# Altium schematic symbol library Sensors-LIB-SCH.SchLib: 19 symbols
Pins are listed as number, name and electrical type; pins without a type are passive.

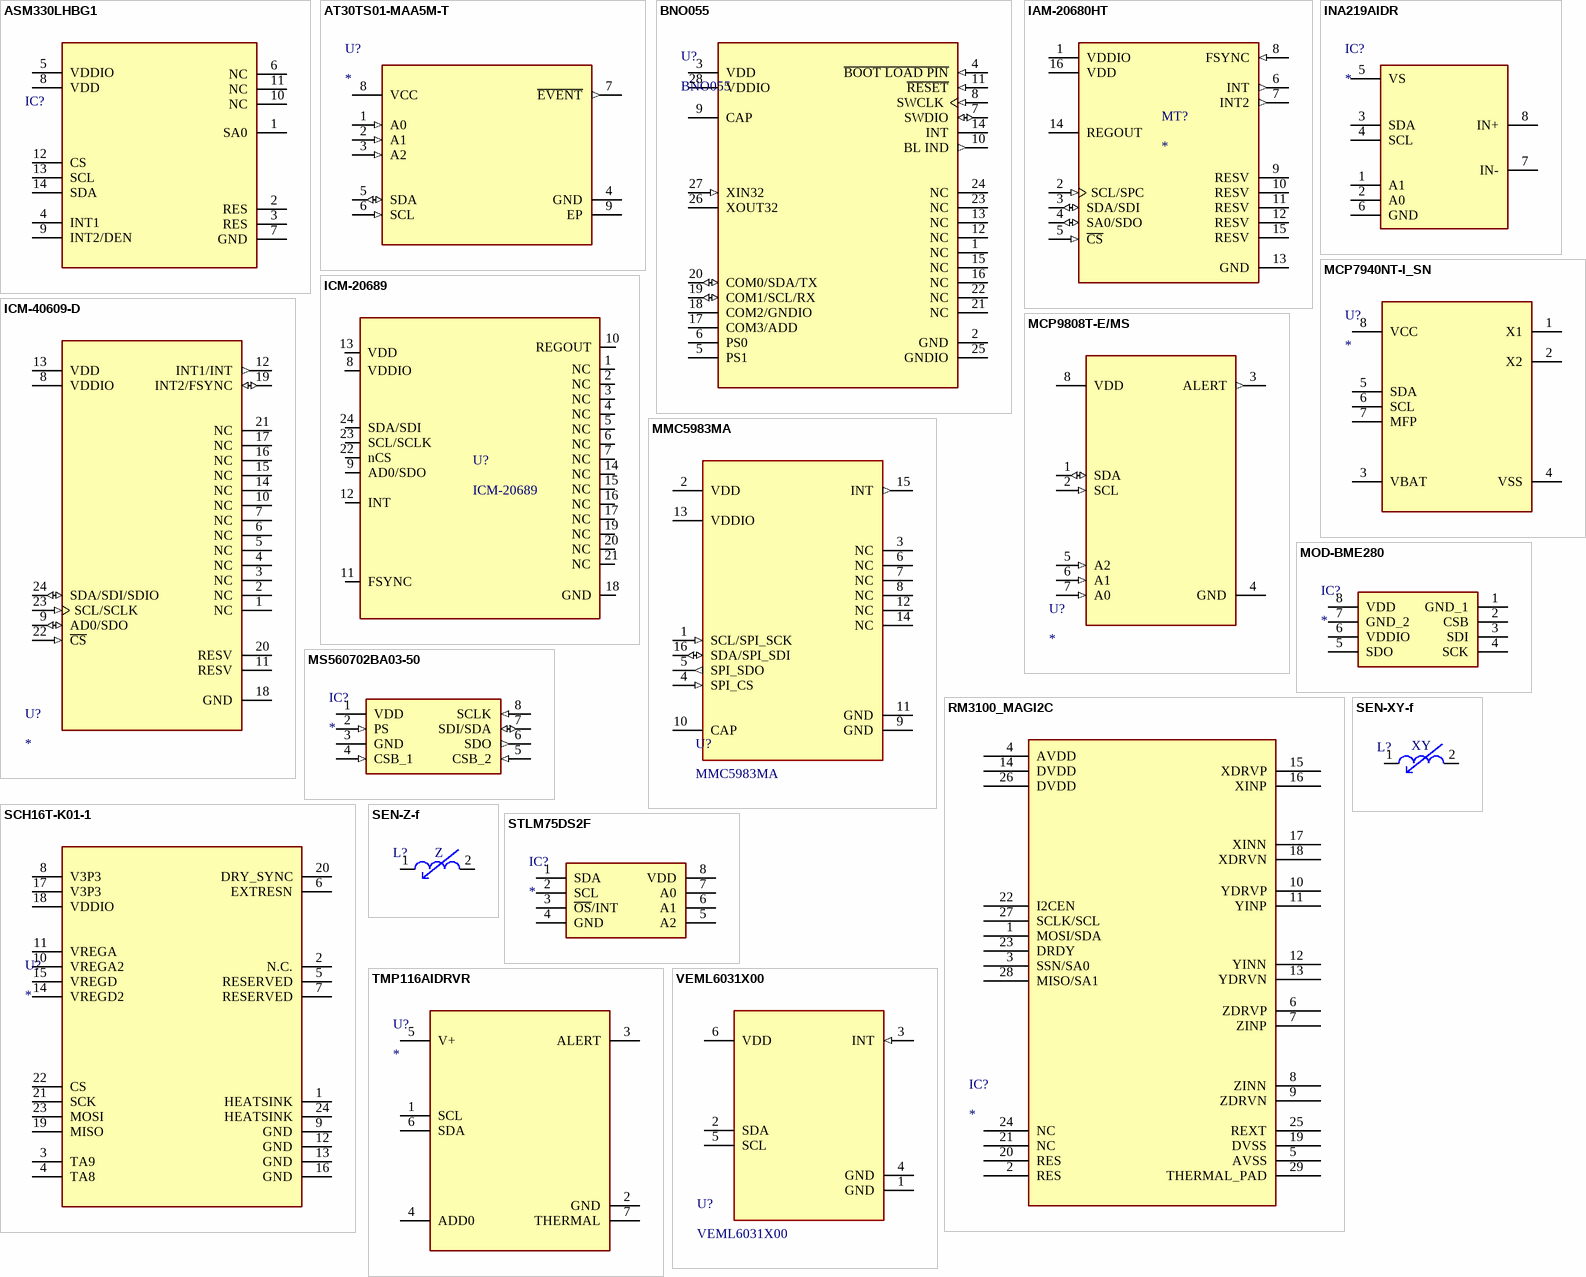
[diagram p0: symbols ASM330LHBG1 to VEML6031X00]

## ASM330LHBG1
designator IC?
Population Status: YES
footprint LGA-14L 2.5 x 3.0 x 0.86
pins: 1 SA0, 2 RES, 3 RES, 4 INT1, 5 VDDIO, 6 NC, 7 GND, 8 VDD, 9 INT2/DEN, 10 NC, 11 NC, 12 CS, 13 SCL, 14 SDA

## AT30TS01-MAA5M-T
designator U?
Integrated Circuit; Manufacturer: Microchip; Manufacturer Part Number: AT30TS01-MAA5M-T; Population Status: YES; Datasheet Link: https://pt.mouser.com/datasheet/2/268/microchip_technology_mchp_s_a0001400554_1-1738106.pdf; Height: 0.8mm; Supplier Part Number: 556-AT30TS01-MAA5M-T
footprint SON50P300X200X80-9N
pins: 1 A0 (in), 2 A1 (in), 3 A2 (in), 4 GND, 5 SDA (io), 6 SCL (in), 7 ~{EVENT} (out), 8 VCC, 9 EP

## BNO055
designator U?
IMUs - Inertial Measurement Units 9-axis MEMS sensor node; Manufacturer: Bosch; Max Current: 12.3mA; Supply Voltage: 3.3V; Est Price INR: 1380; Population Status: YES; Package: LGA-28; Supplier: Mouser; Temperature Range: -40 to 85; Supplier Part Number: 262-BNO055; Datasheet Link: https://www.mouser.in/datasheet/3/1046/1/bst_bno055_ds000.pdf; Height: 1.2mm; Manufacturer Part Number: BNO055; Weight: 0.15g
footprint BNO0XX
pins: 1 NC, 2 GND, 3 VDD (power), 4 ~{BOOT LOAD PIN} (in), 5 PS1, 6 PS0, 7 SWDIO (io), 8 SWCLK (in), 9 CAP, 10 BL IND (out), 11 ~{RESET} (in), 12 NC, 13 NC, 14 INT, 15 NC, 16 NC, 17 COM3/ADD, 18 COM2/GNDIO, 19 COM1/SCL/RX (io), 20 COM0/SDA/TX (io), 21 NC, 22 NC, 23 NC, 24 NC, 25 GNDIO, 26 XOUT32, 27 XIN32 (in), 28 VDDIO (power)

## IAM-20680HT
designator MT?
Manufacturer Part Number: IAM-20680HT; Population Status: YES; Package: None
footprint XDCR_IAM-20680HT
pins: 1 VDDIO (power), 2 SCL/SPC (in), 3 SDA/SDI (io), 4 SA0/SDO (io), 5 ~{CS} (in), 6 INT (out), 7 INT2 (out), 8 FSYNC (in), 9 RESV, 10 RESV, 11 RESV, 12 RESV, 13 GND (power), 14 REGOUT, 15 RESV, 16 VDD (power)

## ICM-20689
designator U?
High Performance 6-Axis MEMS IMU; Manufacturer: TDK InvenSense; Population Status: YES; Manufacturer Part Number: ICM-20689
footprint QFN50P400X400X95_HS-25N (Footprint not found)
pins: 1 NC, 2 NC, 3 NC, 4 NC, 5 NC, 6 NC, 7 NC, 8 VDDIO, 9 AD0/SDO, 10 REGOUT, 11 FSYNC, 12 INT, 13 VDD, 14 NC, 15 NC, 16 NC, 17 NC, 18 GND, 19 NC, 20 NC, 21 NC, 22 nCS, 23 SCL/SCLK, 24 SDA/SDI

## ICM-40609-D
designator U?
Accelerometer, Gyroscope, 6 Axis Sensor I2C, SPI Output; Manufacturer Part Number: ICM-40609-D; Manufacturer: TDK InvenSense; Est Price INR: 560.88; Max Current: 0.77mA; Population Status: YES; Supply Voltage: 1.71 to 3.6V; Package: 24-VFLGA; Datasheet Link: https://product.tdk.com/system/files/dam/doc/product/sensor/mortion-inertial/imu/data_sheet/ds-000330_icm-40609-d_v1.2.pdf; Height: 0.85mm; Supplier Part Number: 1428-ICM-40609-DCT-ND; Supplier: DigiKey; Temperature Range: -40 to 85
footprint XDCR_ICM-40609-D
pins: 1 NC, 2 NC, 3 NC, 4 NC, 5 NC, 6 NC, 7 NC, 8 VDDIO (power), 9 AD0/SDO (io), 10 NC, 11 RESV, 12 INT1/INT (out), 13 VDD (power), 14 NC, 15 NC, 16 NC, 17 NC, 18 GND (power), 19 INT2/FSYNC (io), 20 RESV, 21 NC, 22 ~{CS} (in), 23 SCL/SCLK (in), 24 SDA/SDI/SDIO (io)

## INA219AIDR
designator IC?
Integrated Circuit; Manufacturer: Texas Instruments; Manufacturer Part Number: INA219AIDR; Population Status: YES; Datasheet Link: http://www.ti.com/lit/gpn/ina219; Height: 1.75mm; Supplier Part Number: 595-INA219AIDR
footprint SOIC127P600X175-8N
pins: 1 A1, 2 A0, 3 SDA, 4 SCL, 5 VS, 6 GND, 7 IN-, 8 IN+

## MCP7940NT-I_SN
designator U?
Real Time Clock I2C GP RTCC 64B SRAM; Manufacturer: Microchip; Manufacturer Part Number: MCP7940NT-I/SN; Max Current: 0.0012mA; Supply Voltage: 3.3V; Est Price INR: 79.2; Population Status: YES; Datasheet Link: http://www.microchip.com/mymicrochip/filehandler.aspx?ddocname=en553487; Height: 1.75mm; Supplier Part Number: 579-MCP7940NT-I/SN; Package: SOIC-8; Supplier: Mouser; Temperature Range: -40 to 85; Weight: 0.23g
footprint SOIC127P600X175-8N
pins: 1 X1, 2 X2, 3 VBAT, 4 VSS, 5 SDA, 6 SCL, 7 MFP, 8 VCC

## MCP9808T-E/MS
designator U?
Temperature Sensor Digital, Local -40°C ~ 125°C 12 b 8-MSOP; Manufacturer: Microchip Technology; Manufacturer Part Number: MCP9808T-E/MS; Max Current: 200uA; Supply Voltage: 2.7 to 5.5V; Est Price INR: 130.45; Population Status: YES; Datasheet Link: https://ww1.microchip.com/downloads/en/DeviceDoc/25095A.pdf; Height: 1.1mm; Supplier Part Number: 579-MCP9808T-E/MS; Package: MSOP-8; Supplier: Mouser; Temperature Range: -40 to 125; Weight: 25.6mg
footprint SOP65P490X110-8N
pins: 1 SDA (io), 2 SCL (in), 3 ALERT (out), 4 GND (power), 5 A2 (in), 6 A1 (in), 7 A0 (in), 8 VDD (power)

## MMC5983MA
designator U?
Magnetoresistive Sensor X, Y, Z Axis 16-LGA (3x3); Manufacturer: MEMSIC; Est Price INR: 309.36; Max Current: 0.45mA; Population Status: YES; Supply Voltage: 2.8 to 3.6V; Datasheet Link: https://www.mouser.com/catalog/specsheets/Memsic_09102019_MMC5983MA%20Datasheet%20Rev%20A.pdf; Height: 1mm; Manufacturer Part Number: MMC5983MA; Package: LGA-16; Supplier Part Number: 438-MMC5983MA; Supplier: Mouser; Temperature Range: -40 to 105; Weight: 505mg
footprint MMC5983MA_MEM
pins: 1 SCL/SPI_SCK (in), 2 VDD (power), 3 NC, 4 SPI_CS (in), 5 SPI_SDO (out), 6 NC, 7 NC, 8 NC, 9 GND (power), 10 CAP (power), 11 GND (power), 12 NC, 13 VDDIO (power), 14 NC, 15 INT (out), 16 SDA/SPI_SDI (io)

## MOD-BME280
designator IC?
Integrated Circuit; Manufacturer: Olimex Ltd.; Manufacturer Part Number: MOD-BME280; Population Status: YES; Datasheet Link: https://eu.mouser.com/datasheet/2/306/BME280-1620794.pdf; Height: 1mm; Supplier Part Number: 909-MOD-BME280
footprint MODBME280
pins: 1 GND_1, 2 CSB, 3 SDI, 4 SCK, 5 SDO, 6 VDDIO, 7 GND_2, 8 VDD

## MS560702BA03-50
designator IC?
Integrated Circuit; Manufacturer: TE Connectivity; Manufacturer Part Number: MS560702BA03-50; Population Status: YES; Datasheet Link: https://www.te.com/commerce/DocumentDelivery/DDEController?Action=srchrtrv&DocNm=MS5607-02BA03&DocType=Data%20Sheet&DocLang=English&PartCntxt=MS560702BA03-50&DocFormat=pdf; Supplier Part Number: 824-MS560702BA03-50
footprint MS5607-02BA03
pins: 1 VDD (power), 2 PS (in), 3 GND (power), 4 CSB_1 (in), 5 CSB_2 (in), 6 SDO (out), 7 SDI/SDA (io), 8 SCLK (in)

## RM3100_MAGI2C
designator IC?
Population Status: YES
footprint QFN40P400X400X80_HS-29N (QFN, 28-Leads, Body 4.00x4.00mm, Pitch 0.40mm, Thermal Pad 2.50x2.50mm, IPC Medium Density)
pins: 1 MOSI/SDA, 2 RES, 3 SSN/SA0, 4 AVDD, 5 AVSS, 6 ZDRVP, 7 ZINP, 8 ZINN, 9 ZDRVN, 10 YDRVP, 11 YINP, 12 YINN, 13 YDRVN, 14 DVDD, 15 XDRVP, 16 XINP, 17 XINN, 18 XDRVN, 19 DVSS, 20 RES, 21 NC, 22 I2CEN, 23 DRDY, 24 NC, 25 REXT, 26 DVDD, 27 SCLK/SCL, 28 MISO/SA1, 29 THERMAL_PAD

## SCH16T-K01-1
designator U?
Gyroscopes 6-DOF XYZ-Axis gyroscope 300deg/s and XYZ-Axis accelerometer 8g (26g); Manufacturer: Murata Electronics; Manufacturer Part Number: SCH16T-K01-1; Max Current: 47mA; Supply Voltage: 3.3V; Est Price INR: 5889.91; Population Status: YES; Datasheet Link: https://www.murata.com/-/media/webrenewal/products/sensor/pdf/datasheet/datasheet-sch16t-series-short.ashx?la=en-us&cvid=20240110024121000000; Height: 3mm; Supplier Part Number: 81-SCH16T-K01-1; Package: SOIC-24; Supplier: Mouser; Temperature Range: -40 to 110
footprint SCH16TK011
pins: 1 HEATSINK, 2 N.C., 3 TA9, 4 TA8, 5 RESERVED, 6 EXTRESN, 7 RESERVED, 8 V3P3, 9 GND, 10 VREGA2, 11 VREGA, 12 GND, 13 GND, 14 VREGD2, 15 VREGD, 16 GND, 17 V3P3, 18 VDDIO, 19 MISO, 20 DRY_SYNC, 21 SCK, 22 CS, 23 MOSI, 24 HEATSINK

## SEN-XY-f
designator L?
Population Status: YES
footprint Sen-XY-f
pins: 1 K, 2 A
text: XY

## SEN-Z-f
designator L?
Population Status: YES
footprint Sen-Z-f
pins: 1 K, 2 A
text: Z

## STLM75DS2F
designator IC?
Integrated Circuit; Manufacturer: STMicroelectronics; Manufacturer Part Number: STLM75DS2F; Population Status: YES; Datasheet Link: http://www.st.com/st-web-ui/static/active/en/resource/technical/document/datasheet/CD00153511.pdf; Height: 1.1mm; Supplier Part Number: 511-STLM75DS2F
footprint SOP65P490X110-8N
pins: 1 SDA, 2 SCL, 3 ~{OS}/INT, 4 GND, 5 A2, 6 A1, 7 A0, 8 VDD

## TMP116AIDRVR
designator U?
Temperature Sensor Digital, Local -55°C ~ 125°C 16 b 6-WSON (2x2); Manufacturer: Texas Instruments; Manufacturer Part Number: TMP116AIDRVR; Max Current: 135uA; Supply Voltage: 1.9 to 5.5V; Est Price INR: 310.29; Population Status: YES; Datasheet Link: http://www.ti.com/lit/gpn/tmp116; Height: 0.8mm; Supplier Part Number: 595-TMP116AIDRVR; Package: WSON-6; Supplier: Mouser; Temperature Range: -55 to 125; Weight: 12mg
footprint SON65P200X200X80-7N
pins: 1 SCL, 2 GND, 3 ALERT, 4 ADD0, 5 V+, 6 SDA, 7 THERMAL

## VEML6031X00
designator U?
VEML6031X00 Light to Digital Ambient Light Sensor Digital-OUT 0lux to 228000lux 6-Pin SMD T/R; Manufacturer: Vishay Semiconductors; Est Price INR: 158.41; Max Current: 0.28mA; Population Status: YES; Supply Voltage: 2.5V to 3.6V; Datasheet Link: https://www.vishay.com/docs/80007/veml6031x00.pdf; Height: 0.6mm; Manufacturer Part Number: VEML6031X00; Package: 6-SMD, No Lead; Supplier Part Number: 78-VEML6031X00; Supplier: Mouser; Temperature Range: -40 to 110
footprint SMT_VEML6031_VIS
pins: 1 GND (power), 2 SDA, 3 INT (in), 4 GND (power), 5 SCL, 6 VDD (power)